# Altium footprint library AltiumLibraryDDT.PcbLib: 106 footprints (part 5 of 7)
Each footprint in its own frame and in the unit in brackets; x right, y up, seen from the top. Pads: shape width x height; smd on the part's side, far side on the other; paste and mask are expansions set on the pad; w line width, h text height; cw(c..) or ccw(c..) is an arc to the next point about the centre after c.
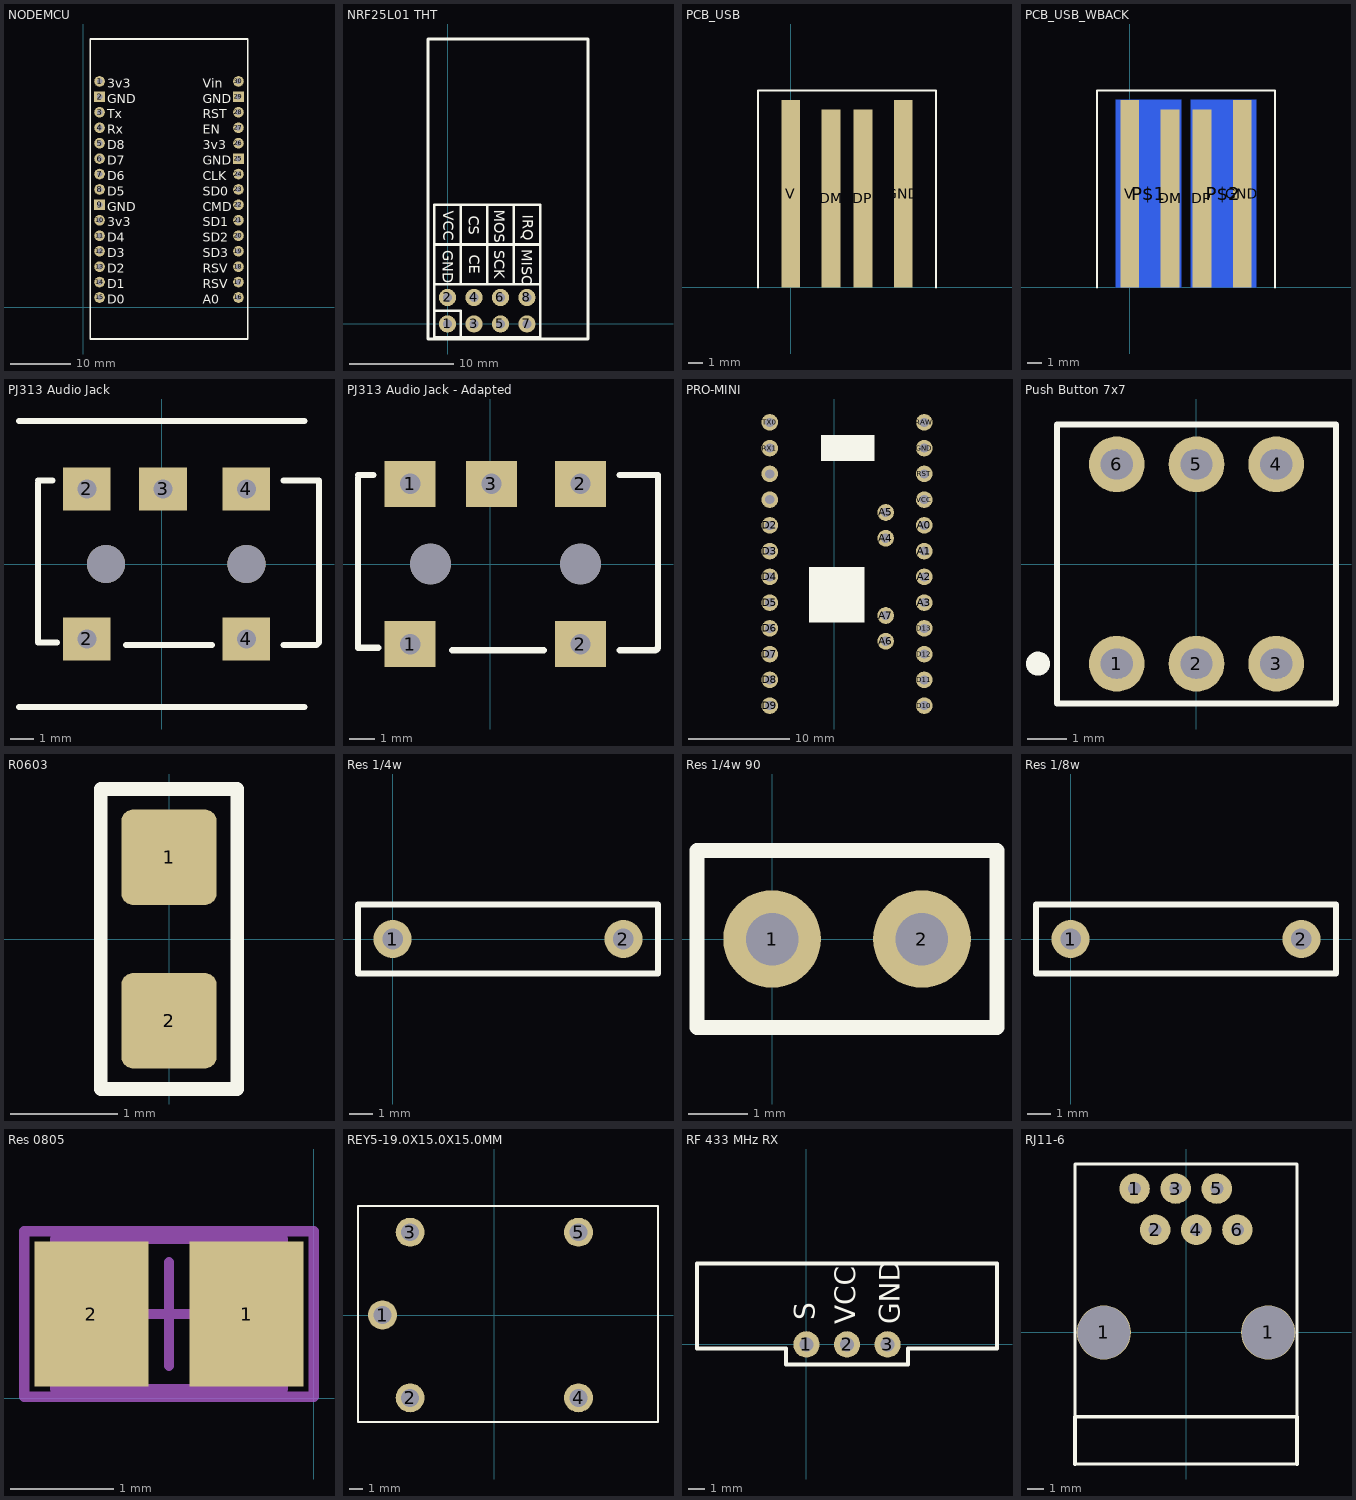
[diagram p4: the footprints below, top view; thin cyan lines are the x and y axes]

## NODEMCU [mil]
pads (30):
  round 69 hole 35: 1(105,1463) 3(105,1263) 4(105,1163) 5(105,1063) 6(105,963) 7(105,863) 8(105,763) 10(105,563) 11(105,463) 12(105,363) 13(105,263) 14(105,163) 15(105,63) 16(1005,63) 17(1005,163) 18(1005,263) 19(1005,363) 20(1005,463) 21(1005,563) 22(1005,663) 23(1005,763) 24(1005,863) 26(1005,1063) 27(1005,1163) 28(1005,1263) 30(1005,1463)
  rect 69x69 hole 35: 2(105,1363) 9(105,663) 25(1005,963) 29(1005,1363)
Top Overlay:
  lines w10: 45,-206 1065,-206 1065,1738 45,1738 45,-206
  text "Vin" at 775,1423.01 h60
  text "GND" at 775,1323.01 h60
  text "RST" at 775,1223.01 h60
  text "EN" at 775,1123.01 h60
  text "3v3" at 775,1023.01 h60
  text "GND" at 775,923.01 h60
  text "CLK" at 775,823.01 h60
  text "SD0" at 775,723.01 h60
  text "CMD" at 775,623.01 h60
  text "SD1" at 775,523.01 h60
  text "SD2" at 775,423.01 h60
  text "SD3" at 775,323.01 h60
  text "RSV" at 775,223.01 h60
  text "RSV" at 775,123.01 h60
  text "A0" at 775,23.01 h60
  text "D0" at 155,23.01 h60
  text "D1" at 155,123.01 h60
  text "D2" at 155,223.01 h60
  text "D3" at 155,323.01 h60
  text "D4" at 155,423.01 h60
  text "3v3" at 155,523.01 h60
  text "GND" at 155,623.01 h60
  text "D5" at 155,723.01 h60
  text "D6" at 155,823.01 h60
  text "D7" at 155,923.01 h60
  text "D8" at 155,1023.01 h60
  text "Rx" at 155,1123.01 h60
  text "Tx" at 155,1223.01 h60
  text "GND" at 155,1323.01 h60
  text "3v3" at 155,1423.01 h60
3D body "ESP8266 v7.stp": height 309.06, standoff -245.67, extent 54.1,-191 1060,1731.05

## NRF25L01 THT [mil]
pads (8):
  round 65 hole 35: 1(0,0) 2(0,100) 3(100,0) 4(100,100) 5(200,0) 6(200,100) 7(300,0) 8(300,100)
Top Overlay:
  lines w10: -50,50 50,50 50,-50 ; -50,300 350,300 ; 50,150 50,450 ; 150,150 150,450 ; 250,150 250,450 ; -50,150 350,150 ; -50,150 -50,-50 350,-50 350,150 ; -50,150 -50,450 350,450 350,150 ; -74,-57 520,-57 530,-57 531,-57 531,1076 530,1077 -74,1077 -74,-57
  text "GND" at -19,279 h39.37
  text "CE" at 82,262 h39.37
  text "SCK" at 177,279 h39.37
  text "MISO" at 280,283 h39.37
  text "IRQ" at 285,412 h39.37
  text "MOSI" at 177,432 h39.37
  text "CS" at 80,408 h39.37
  text "VCC" at -17,427 h39.37
3D body "?????? ?????????? NRF24L01+.STEP": height 503.94, standoff -19.69, extent -73.33,-56 531,1077.85

## PCB_USB [mil]
pads (4):
  rect 50x475 smd: DM(107.5,237.5) DP(192.5,237.5)
  rect 50x500 smd: GND(300,250) V(0,250)
Top Overlay:
  lines w5.91: -87.5,0 -87.5,525 387.5,525 387.5,0

## PCB_USB_WBACK [mil]
pads (6):
  rect 50x475 smd: DM(107.5,237.5) DP(192.5,237.5)
  rect 50x500 smd: GND(300,250) V(0,250)
  rect 175x500 smd far side: P$1(50,250) P$2(250,250)
Top Overlay:
  lines w5.91: -87.5,0 -87.5,525 387.5,525 387.5,0

## PJ313 Audio Jack [mm] "PJ313 Audio Jack"
pads (7):
  rect 2x1.8 hole 0.8 square: 2(-3.15,-3.15) 2(-3.15,3.15) 3(0.05,3.15) 4(3.55,-3.15) 4(3.55,3.15)
  round 1.6 hole 1.6: ""(-2.35,0) ""(3.55,0)
Top Overlay:
  lines w0.254: -6,-6 6,-6 ; -6,6 6,6 ; -5.2,3.4 -5.2,-3.3 -4.4,-3.3 ; -5.2,3.5 -4.6,3.5 ; -1.5,-3.4 2.1,-3.4 ; 5.1,-3.4 6.5,-3.4 6.6,-3.3 6.6,3.5 5.1,3.5
3D body "TRS Jack.stp": height 5.11, standoff -2.91, extent -7.367,-3.347 6.633,3.459

## PJ313 Audio Jack - Adapted [mm] "PJ313 Audio Jack"
pads (7):
  rect 2x1.8 hole 0.8 square: 1(-3.15,-3.15) 1(-3.15,3.15) 2(3.55,-3.15) 2(3.55,3.15) 3(0.05,3.15)
  round 1.6 hole 1.6: ""(-2.35,0) ""(3.55,0)
Top Overlay:
  lines w0.254: -5.2,3.4 -5.2,-3.3 -4.4,-3.3 ; -5.2,3.5 -4.6,3.5 ; -1.5,-3.4 2.1,-3.4 ; 5.1,-3.4 6.5,-3.4 6.6,-3.3 6.6,3.5 5.1,3.5
3D body "TRS Jack.stp": height 5.11, standoff -2.91, extent -7.367,-3.347 6.633,3.459

## PRO-MINI [mil]
pads (28):
  round 65 hole 35: A0(350,850) A1(350,750) A2(350,650) A3(350,550) A4(200,800) A5(200,900) A6(200,400) A7(200,500) D2(-250,850) D3(-250,750) D4(-250,650) D5(-250,550) D6(-250,450) D7(-250,350) D8(-250,250) D9(-250,150) D10(350,150) D11(350,250) D12(350,350) D13(350,450) GND(350,1150) GND1(-250,950) RAW(350,1250) RST(350,1050) RST1(-250,1050) RX1(-250,1150) TX0(-250,1250) VCC(350,950)
Top Overlay:
  region: 118.11,688.98 -98.43,688.98 -98.43,472.44 118.11,472.44
  region: 157.48,1200.79 -50.2,1200.79 -50.2,1099.41 157.48,1099.41
3D body "ARDUINO PRO MINI ATMEGA328P.STEP": height 316.54, standoff 61.02, extent -316.93,-36.42 411.41,1302.17

## Push Button 7x7 [mm] "7x7 SELF-LOCK BUTTON - 2mm DIP"
pads (6):
  round 1.4 hole 0.75 slot 0.8 at 0 deg: 1(-2,-2.5) 2(0,-2.5) 3(2,-2.5) 4(2,2.5) 5(0,2.5) 6(-2,2.5)
Top Overlay:
  circle w0.5: c-3.975,-2.5 r0.05
  lines w0.15: -3.5,-3.5 -3.5,3.5 3.5,3.5 3.5,-3.5 -3.5,-3.5
3D body "7x7 SELF-LOCK BUTTON - 2mm DIP.SLDPRT": height 12.7, standoff -3.7, extent -3.5,-3.5 3.5,3.5

## R0603 [mil]
pads (2):
  rrect25% 35x35 smd: 1(0,30) 2(0,-30)
Top Overlay:
  lines w5: -25,-55 -25,55 25,55 25,-55 -25,-55
3D body "res0603r.STEP": height 17.72, standoff 0, extent -15.49,-31.5 16,31.5

## Res 1/4w [mil]
pads (2):
  round 65 hole 35: 1(0,0) 2(393.7,0)
Top Overlay:
  lines w10: -59.06,-59.06 452.76,-59.06 452.76,59.06 -59.06,59.06 -59.06,-59.06
3D body "1Kohm.stp": height 154.82, standoff -60.63, extent -15,-44.24 409,46.76

## Res 1/4w 90 [mil]
pads (2):
  round 65 hole 35: 1(0,0) 2(100,0)
Top Overlay:
  lines w10: -50,-59.06 150,-59.06 150,59.06 -50,59.06 -50,-59.06
3D body "Widerstand.obj.stp": height 359.82, standoff -75.59, extent -40,-46.61 113.08,40

## Res 1/8w [mil]
pads (2):
  round 65 hole 35: 1(0,0) 2(393.7,0)
Top Overlay:
  lines w10: -59.06,-59.06 452.76,-59.06 452.76,59.06 -59.06,59.06 -59.06,-59.06
3D body "1Kohm.stp": height 154.82, standoff -60.63, extent -15,-44.24 409,46.76

## Res 0805 [mm]
pads (2):
  rect 1.1x1.4 smd: 1(-0.647,0.813) 2(-2.147,0.813)
Mechanical 13:
  lines w0.1: -2.497,0.088 -2.497,1.538 -0.297,1.538 -0.297,0.088 -2.497,0.088
Mechanical 15:
  lines w0.1: -1.897,0.813 -0.897,0.813 ; -1.397,0.313 -1.397,1.313 ; -2.797,0.013 -2.797,1.613 0.003,1.613 0.003,0.013 -2.797,0.013
3D body "RES0805.stp": height -0.43, standoff -0.93, extent -2.397,0.183 -0.397,1.433

## REY5-19.0X15.0X15.0MM [mm]
pads (5):
  round 2.1 hole 1.3: 1(-8.1,0) 2(-6.1,-6) 3(-6.1,6) 4(6.1,-6) 5(6.1,6)
Top Overlay:
  lines w0.127: -9.881,-7.75 -9.881,7.899 11.862,7.899 11.862,-7.75 -9.881,-7.75
3D body "OMRON G5LE Series.stp": height 18.5, standoff -3.5, extent -9.764,-7.775 11.836,7.825

## RF 433 MHz RX [mil]
pads (3):
  round 65 hole 35: 1(0,0) 2(100,0) 3(200,0)
Top Overlay:
  lines w10: -270,-10 -270,200 470,200 470,-10 250,-10 250,-50 -50,-50 -50,-10 -270,-10
  text "S" at 20,60 h50
  text "VCC" at 120,50 h50
  text "GND" at 230,50 h50
3D body "433MhzTX.STEP": height 767.72, standoff -201.97, extent -274.02,-8.27 474.02,200

## RJ11-6 [mil] "54601-906WPLF CONN MOD JACK 6P6C R/A UNSHLD"
pads (8):
  round 131.89 hole 128: 1(-200,0) 1(200,0)
  round 74 hole 31.5: 1(-125,350) 2(-75,250) 3(-25,350) 4(25,250) 5(75,350) 6(125,250)
Top Overlay:
  lines w8: -270,-320 270,-320 ; -270,-205 270,-205 270,410 -270,410 -270,-205
  lines w10: -270,-320 -270,-205 ; 270,-320 270,-205
3D body "RJ11-54601-906WPLFc.stp": height 452.76, standoff -147.64, extent -261.69,-310 258,398.66